# EAGLE library part USBC (library orb)
TE Connectivity 2345986-1 USB-C receptacle (24 pads, USB 3.1 top mount, dual row SMT; only the USB 2.0 pads are used)
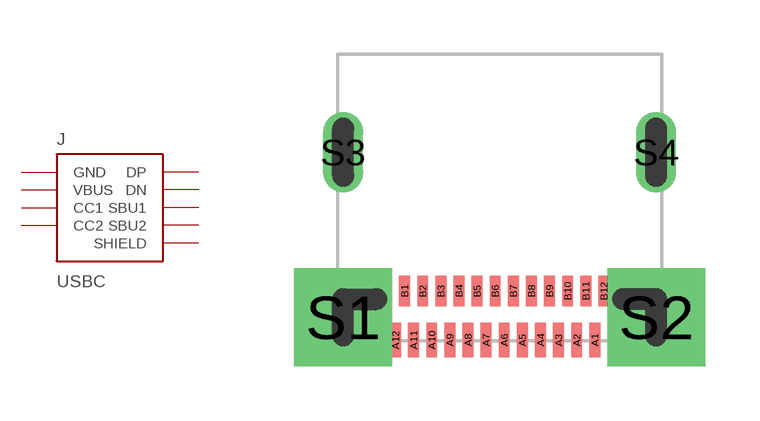
[diagram p8: symbol with the pads of USBC24_TE2345986; footprint USBC24_TE2345986]

Designator prefix J

## USBC  [USBC24_TE2345986]
A1  GND  pas
A4  VBUS  pas
A5  CC1  pas
A6  DP  pas
A7  DN  pas
A8  SBU1  pas
A9  VBUS  pas
A12  GND  pas
B1  GND  pas
B4  VBUS  pas
B5  CC2  pas
B6  DP  pas
B7  DN  pas
B8  SBU2  pas
B9  VBUS  pas
B12  GND  pas
S1  SHIELD  pas
S2  SHIELD  pas
S3  SHIELD  pas
S4  SHIELD  pas

## Footprint USBC24_TE2345986 (pad centres in mm)
TE 2345986-1 drawing ENG_CD_2345986_C, recommended PCB land pattern rotated to mouth +Y. Origin is the manufacturer PCB-edge/front-face reference; pad rows -7.875/-6.525 mm. Slotted mount representation uses plated drill anchors plus layer-46 milling; fabricator must verify L-slot/annular geometry before release. Rear ground copper deliberately enlarged for slot annulus. Source: https://www.te.com/en/product-2345986-1.html
smd 0.3 x 0.95: A1 2.625,-7.875; A2 2.125,-7.875; A3 1.625,-7.875; A4 1.125,-7.875; A5 0.625,-7.875; A6 0.125,-7.875; A7 -0.375,-7.875; A8 -0.875,-7.875; A9 -1.375,-7.875; A10 -1.875,-7.875; A11 -2.375,-7.875; A12 -2.875,-7.875
smd 0.3 x 0.85: B1 -2.625,-6.525; B2 -2.125,-6.525; B3 -1.625,-6.525; B4 -1.125,-6.525; B5 -0.625,-6.525; B6 -0.125,-6.525; B7 0.375,-6.525; B8 0.875,-6.525; B9 1.375,-6.525; B10 1.875,-6.525; B11 2.375,-6.525; B12 2.875,-6.525
drill 0.6 pad 2.7 square: S1 -4.32,-7.25; S2 4.32,-7.25
drill 0.6 pad 1.075 long: S3 -4.32,-2.7; S4 4.32,-2.7